# Altium footprint library Regulator$.PcbLib: 106 footprints (part 7 of 7)
Each footprint in its own frame and in the unit in brackets; x right, y up, seen from the top. Pads: shape width x height; smd on the part's side, far side on the other; paste and mask are expansions set on the pad; w line width, h text height; cw(c..) or ccw(c..) is an arc to the next point about the centre after c.
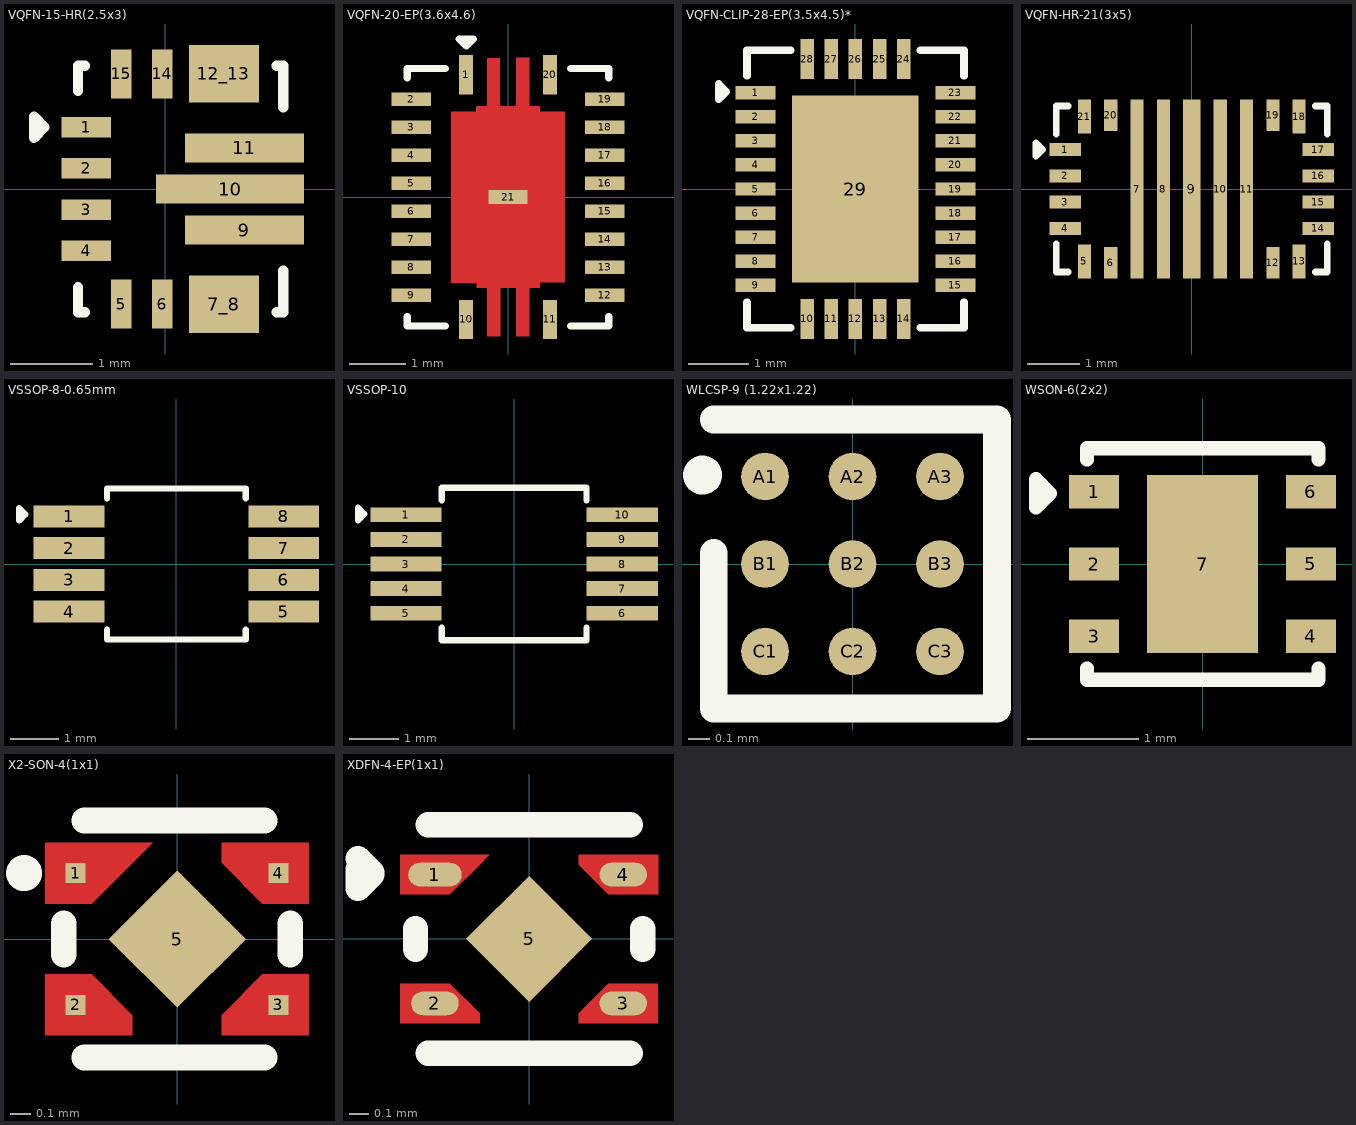
[diagram p6: the footprints below, top view; thin cyan lines are the x and y axes]

## VQFN-15-HR(2.5x3) [mm]
pads (13):
  rect 0.6x0.25 smd: 1(-0.962,0.75) 2(-0.962,0.25) 3(-0.962,-0.25) 4(-0.962,-0.75)
  rect 0.25x0.6 smd: 5(-0.537,-1.4) 6(-0.038,-1.4) 14(-0.038,1.4) 15(-0.537,1.4)
  rect 0.85x0.7 smd: 7_8(0.713,-1.4) 12_13(0.713,1.4)
  rect 1.45x0.35 smd: 9(0.962,-0.5) 11(0.962,0.5)
  rect 1.8x0.35 smd: 10(0.787,0)
Top Overlay:
  lines w0.127: -1.062,-1.195 -1.062,-1.5 -0.982,-1.5 ; -1.062,1.195 -1.062,1.5 -0.982,1.5 ; 1.358,-1.5 1.438,-1.5 1.438,-0.995 ; 1.358,1.5 1.438,1.5 1.438,0.995 ; -1.597,0.623 -1.597,0.877 -1.47,0.75 -1.597,0.623
3D body "TPS63070RNMR--3DModel-STEP-56544.STEP": height 1, standoff 0, extent -1.047,-1.5 1.453,1.5

## VQFN-20-EP(3.6x4.6) [mm]
pads (21):
  rect 0.244x0.7 smd paste+0 mask+0.05: 1(-0.75,2.185) 10(-0.75,-2.185) 11(0.75,-2.185) 20(0.75,2.185)
  rect 0.7x0.244 smd paste+0 mask+0.05: 2(-1.727,1.748) 3(-1.727,1.248) 4(-1.727,0.748) 5(-1.727,0.248) 6(-1.727,-0.252) 7(-1.727,-0.752) 8(-1.727,-1.252) 9(-1.727,-1.752) 12(1.727,-1.752) 13(1.727,-1.252) 14(1.727,-0.752) 15(1.727,-0.252) 16(1.727,0.248) 17(1.727,0.748) 18(1.727,1.248) 19(1.727,1.748) 21(0,0)
Top Layer:
  region: 0.143,1.621 0.146,2.485 0.376,2.485 0.38,1.621 0.565,1.618 0.566,1.522 1.016,1.521 1.016,-1.526 0.571,-1.523 0.571,-1.621 0.381,-1.624 0.381,-2.485 0.147,-2.485 0.147,-1.621 -0.137,-1.624 -0.137,-2.485 -0.371,-2.485 -0.371,-1.621 -0.561,-1.624 -0.561,-1.526 -1.014,-1.526 -1.016,1.522 -0.567,1.522 -0.567,1.62 -0.374,1.619 -0.374,2.481 -0.143,2.48 -0.144,1.618 0.145,1.619
Top Overlay:
  lines w0.127: -1.8,-2.133 -1.8,-2.302 -1.115,-2.302 ; -1.8,2.129 -1.8,2.298 -1.115,2.298 ; 1.115,-2.302 1.8,-2.302 1.8,-2.133 ; 1.115,2.298 1.8,2.298 1.8,2.129 ; -0.871,2.823 -0.617,2.823 -0.744,2.696 -0.871,2.823
3D body "TPS61088RHLR.step": height 1, standoff 0, extent -1.75,-2.25 1.75,2.25

## VQFN-CLIP-28-EP(3.5x4.5)* [mm]
pads (29):
  rect 0.665x0.224 smd paste-100 mask+0.05: 1(-1.658,1.6) 2(-1.658,1.2) 3(-1.658,0.8) 4(-1.658,0.4) 5(-1.658,0) 6(-1.658,-0.4) 7(-1.658,-0.8) 8(-1.658,-1.2) 9(-1.658,-1.6) 15(1.658,-1.6) 16(1.658,-1.2) 17(1.658,-0.8) 18(1.658,-0.4) 19(1.658,0) 20(1.658,0.4) 21(1.658,0.8) 22(1.658,1.2) 23(1.658,1.6)
  rect 0.224x0.665 smd paste-100 mask+0.05: 10(-0.8,-2.157) 11(-0.4,-2.157) 12(0,-2.157) 13(0.4,-2.157) 14(0.8,-2.157) 24(0.8,2.157) 25(0.4,2.157) 26(0,2.157) 27(-0.4,2.157) 28(-0.8,2.157)
  rect 2.1x3.1 smd paste-100 mask+0.05: 29(0,0)
Top Overlay:
  lines w0.127: -1.801,-1.877 -1.801,-2.301 -1.077,-2.301 ; -1.801,1.877 -1.801,2.301 -1.077,2.301 ; 1.077,-2.301 1.801,-2.301 1.801,-1.877 ; 1.077,2.301 1.801,2.301 1.801,1.877 ; -2.271,1.488 -2.144,1.615 -2.271,1.742 -2.271,1.488
Top Paste:
  region: -1.325,0.912 -1.99,0.912 -1.99,0.688 -1.325,0.688
  region: -1.325,0.512 -1.99,0.512 -1.99,0.288 -1.325,0.288
  region: -1.99,1.088 -1.325,1.088 -1.325,1.312 -1.99,1.312
  region: -1.325,0.112 -1.99,0.112 -1.99,-0.112 -1.325,-0.112
  region: -1.325,-0.288 -1.99,-0.288 -1.99,-0.512 -1.325,-0.512
  region: -1.99,-1.312 -1.325,-1.312 -1.325,-1.088 -1.99,-1.088
  region: -1.325,-0.688 -1.99,-0.688 -1.99,-0.912 -1.325,-0.912
  region: -1.99,1.488 -1.325,1.488 -1.325,1.712 -1.99,1.712
  region: -1.325,-1.488 -1.99,-1.488 -1.99,-1.712 -1.325,-1.712
  region: -0.688,-1.825 -0.912,-1.825 -0.912,-2.49 -0.688,-2.49
  region: -0.688,2.49 -0.912,2.49 -0.912,1.825 -0.688,1.825
  region: -0.288,-1.825 -0.512,-1.825 -0.512,-2.49 -0.288,-2.49
  region: -0.512,1.825 -0.288,1.825 -0.288,2.49 -0.512,2.49
  region: 0.112,-1.825 -0.112,-1.825 -0.112,-2.49 0.112,-2.49
  region: -0.112,1.825 0.112,1.825 0.112,2.49 -0.112,2.49
  region: 0.512,2.49 0.288,2.49 0.288,1.825 0.512,1.825
  region: 0.512,-1.825 0.288,-1.825 0.288,-2.49 0.512,-2.49
  region: 0.912,2.49 0.688,2.49 0.688,1.825 0.912,1.825
  region: 0.912,-1.825 0.688,-1.825 0.688,-2.49 0.912,-2.49
  region: -0.9,-1.3 0.9,-1.3 0.9,1.3 -0.9,1.3
  region: 1.325,-0.912 1.99,-0.912 1.99,-0.688 1.325,-0.688
  region: 1.325,-0.512 1.99,-0.512 1.99,-0.288 1.325,-0.288
  region: 1.325,-0.112 1.99,-0.112 1.99,0.112 1.325,0.112
  region: 1.99,-1.088 1.325,-1.088 1.325,-1.312 1.99,-1.312
  region: 1.325,0.288 1.99,0.288 1.99,0.512 1.325,0.512
  region: 1.325,0.688 1.99,0.688 1.99,0.912 1.325,0.912
  region: 1.325,1.488 1.99,1.488 1.99,1.712 1.325,1.712
  region: 1.99,-1.488 1.325,-1.488 1.325,-1.712 1.99,-1.712
  region: 1.325,1.088 1.99,1.088 1.99,1.312 1.325,1.312
3D body "TPS548A20RVER.step": height 1, standoff 0, extent -1.75,-2.25 1.75,2.25

## VQFN-HR-21(3x5) [mm]
pads (21):
  rect 0.6x0.25 smd paste+0 mask+0.051: 1(-2.4,0.75) 2(-2.4,0.25) 3(-2.4,-0.25) 4(-2.4,-0.75) 14(2.4,-0.75) 15(2.4,-0.25) 16(2.4,0.25) 17(2.4,0.75)
  rect 0.25x0.65 smd paste+0 mask+0.051: 5(-2.04,-1.375) 13(2.04,-1.375) 18(2.04,1.375) 21(-2.04,1.375)
  rect 0.25x0.6 smd paste+0 mask+0.051: 6(-1.54,-1.4) 12(1.54,-1.4) 19(1.54,1.4) 20(-1.54,1.4)
  rect 0.25x3.4 smd paste+0 mask+0.051: 7(-1.04,0) 8(-0.54,0) 10(0.54,0) 11(1.04,0)
  rect 0.33x3.4 smd paste+0 mask+0.051: 9(0,0)
Top Overlay:
  lines w0.127: -2.576,-1.042 -2.576,-1.576 -2.345,-1.576 ; -2.576,1.042 -2.576,1.576 -2.345,1.576 ; 2.345,-1.576 2.576,-1.576 2.576,-1.042 ; 2.345,1.576 2.576,1.576 2.576,1.042 ; -2.959,0.621 -2.832,0.748 -2.959,0.875 -2.959,0.621
3D body "TPS55289RYQR.step": height 1, standoff 0, extent -2.5,-1.5 2.5,1.5

## VSSOP-8-0.65mm [mm]
pads (8):
  rect 1.45x0.45 smd: 1(-2.2,0.975) 2(-2.2,0.325) 3(-2.2,-0.325) 4(-2.2,-0.975) 5(2.2,-0.975) 6(2.2,-0.325) 7(2.2,0.325) 8(2.2,0.975)
Top Overlay:
  lines w0.127: -1.422,-1.346 -1.422,-1.549 1.422,-1.549 1.422,-1.346 ; -1.422,1.346 -1.422,1.549 1.422,1.549 1.422,1.346 ; -3.226,0.889 -3.099,1.016 -3.226,1.143 -3.226,0.889
3D body "LM2623AMM_NOPB.STEP": height 1.1, standoff 0, extent -2.45,-1.5 2.45,1.5

## VSSOP-10 [mm]
pads (10):
  rect 1.45x0.3 smd paste+0 mask+0.05: 1(-2.2,1) 2(-2.2,0.5) 3(-2.2,0) 4(-2.2,-0.5) 5(-2.2,-1) 6(2.2,-1) 7(2.2,-0.5) 8(2.2,0) 9(2.2,0.5) 10(2.2,1)
Top Overlay:
  lines w0.127: -1.473,-1.295 -1.473,-1.549 1.473,-1.549 1.473,-1.295 ; -1.473,1.295 -1.473,1.549 1.473,1.549 1.473,1.295 ; -3.175,0.889 -3.048,1.016 -3.175,1.143 -3.175,0.889
3D body "LTC2634HMSE-LMI10#PBF.STEP": height 1.07, standoff -0.03, extent -2.45,-1.5 2.45,1.5

## WLCSP-9 (1.22x1.22) [mm]
pads (9):
  round 0.218 smd mask+0.055: A1(-0.4,0.4) A2(0,0.4) A3(0.4,0.4) B1(-0.4,0) B2(0,0) B3(0.4,0) C1(-0.4,-0.4) C2(0,-0.4) C3(0.4,-0.4)
Top Overlay:
  circle w0.127: c-0.686,0.406 r0.025
  lines w0.127: -0.635,0.051 -0.635,-0.66 0.66,-0.66 0.66,0.66 -0.635,0.66
3D body "WLCSP9_1P2X1P2_ONS.step": height 0.59, standoff 0, extent -0.61,-0.61 0.61,0.61

## WSON-6(2x2) [mm]
pads (7):
  rect 0.45x0.3 smd: 1(-0.975,0.65) 2(-0.975,0) 3(-0.975,-0.65) 4(0.975,-0.65) 5(0.975,0) 6(0.975,0.65)
  rect 1x1.6 smd: 7(0,0)
Top Overlay:
  lines w0.127: -1.041,-0.941 -1.041,-1.041 1.041,-1.041 1.041,-0.941 ; -1.041,0.941 -1.041,1.041 1.041,1.041 1.041,0.941 ; -1.499,0.508 -1.499,0.762 -1.372,0.635 -1.499,0.508
3D body "TPS7A2633DRVR.STEP": height 0.69, standoff -0.06, extent -1,-1 1,1

## X2-SON-4(1x1) [mm]
pads (5):
  rect 0.1x0.1 smd paste-1 mask+0: 1(-0.5,0.325) 2(-0.5,-0.325) 3(0.5,-0.325) 4(0.5,0.325)
  rect 0.48x0.48 smd rot 135: 5(0,0)
Top Layer:
  region: -0.42,0.175 -0.65,0.175 -0.65,0.475 -0.12,0.475
  region: -0.65,-0.475 -0.65,-0.175 -0.42,-0.175 -0.22,-0.375 -0.22,-0.475
  region: 0.22,-0.475 0.22,-0.375 0.42,-0.175 0.65,-0.175 0.65,-0.475
  region: 0.42,0.175 0.22,0.375 0.22,0.475 0.65,0.475 0.65,0.175
Top Overlay:
  circle w0.127: c-0.754,0.325 r0.025
  lines w0.127: -0.559,-0.076 -0.559,0.076 ; -0.457,-0.584 0.432,-0.584 ; -0.457,0.584 0.432,0.584 ; 0.559,-0.076 0.559,0.076
Top Paste:
  region: -0.42,0.175 -0.65,0.175 -0.65,0.475 -0.12,0.475
  region: -0.65,-0.475 -0.65,-0.175 -0.42,-0.175 -0.22,-0.375 -0.22,-0.475
  region: 0.22,-0.475 0.22,-0.375 0.42,-0.175 0.65,-0.175 0.65,-0.475
  region: 0.42,0.175 0.22,0.375 0.22,0.475 0.65,0.475 0.65,0.175
Top Solder:
  region: -0.4,0.125 -0.7,0.125 -0.7,0.525 -0.05,0.525 -0.05,0.475
  region: 0.175,-0.525 0.175,-0.35 0.4,-0.125 0.7,-0.125 0.7,-0.525
  region: -0.7,-0.525 -0.7,-0.125 -0.4,-0.125 -0.175,-0.35 -0.175,-0.525
  region: 0.4,0.125 0.175,0.35 0.175,0.525 0.7,0.525 0.7,0.125
3D body "step_temp.STEP": height 0.58, standoff -0.03, extent -0.5,-0.5 0.5,0.5

## XDFN-4-EP(1x1) [mm]
pads (5):
  oval 0.27x0.12 smd: 1(-0.475,0.325)
  oval 0.24x0.12 smd: 2(-0.475,-0.325) 3(0.475,-0.325) 4(0.475,0.325)
  rect 0.45x0.45 smd rot 135 paste+0 mask+0.051: 5(0,0)
Top Layer:
  region: -0.65,-0.425 -0.65,-0.225 -0.4,-0.225 -0.25,-0.375 -0.25,-0.425
  region: 0.65,0.425 0.65,0.225 0.4,0.225 0.25,0.375 0.25,0.425
  region: 0.65,-0.425 0.25,-0.425 0.25,-0.375 0.4,-0.225 0.65,-0.225
  region: -0.4,0.225 -0.65,0.225 -0.65,0.425 -0.2,0.425 -0.25,0.375
Top Overlay:
  lines w0.127: -0.864,0.354 -0.864,0.254 -0.793,0.325 ; -0.864,0.406 -0.793,0.336 ; -0.573,-0.052 -0.573,0.052 ; -0.51,-0.576 0.51,-0.576 ; -0.51,0.576 0.51,0.576 ; 0.573,-0.052 0.573,0.052
3D body "C379350.step": height 0.62, standoff 0, extent -0.51,-0.5 0.51,0.5